# Altium footprint library Propia.PcbLib: 378 footprints (part 21 of 24)
Each footprint in its own frame and in the unit in brackets; x right, y up, seen from the top. Pads: shape width x height; smd on the part's side, far side on the other; paste and mask are expansions set on the pad; w line width, h text height; cw(c..) or ccw(c..) is an arc to the next point about the centre after c.
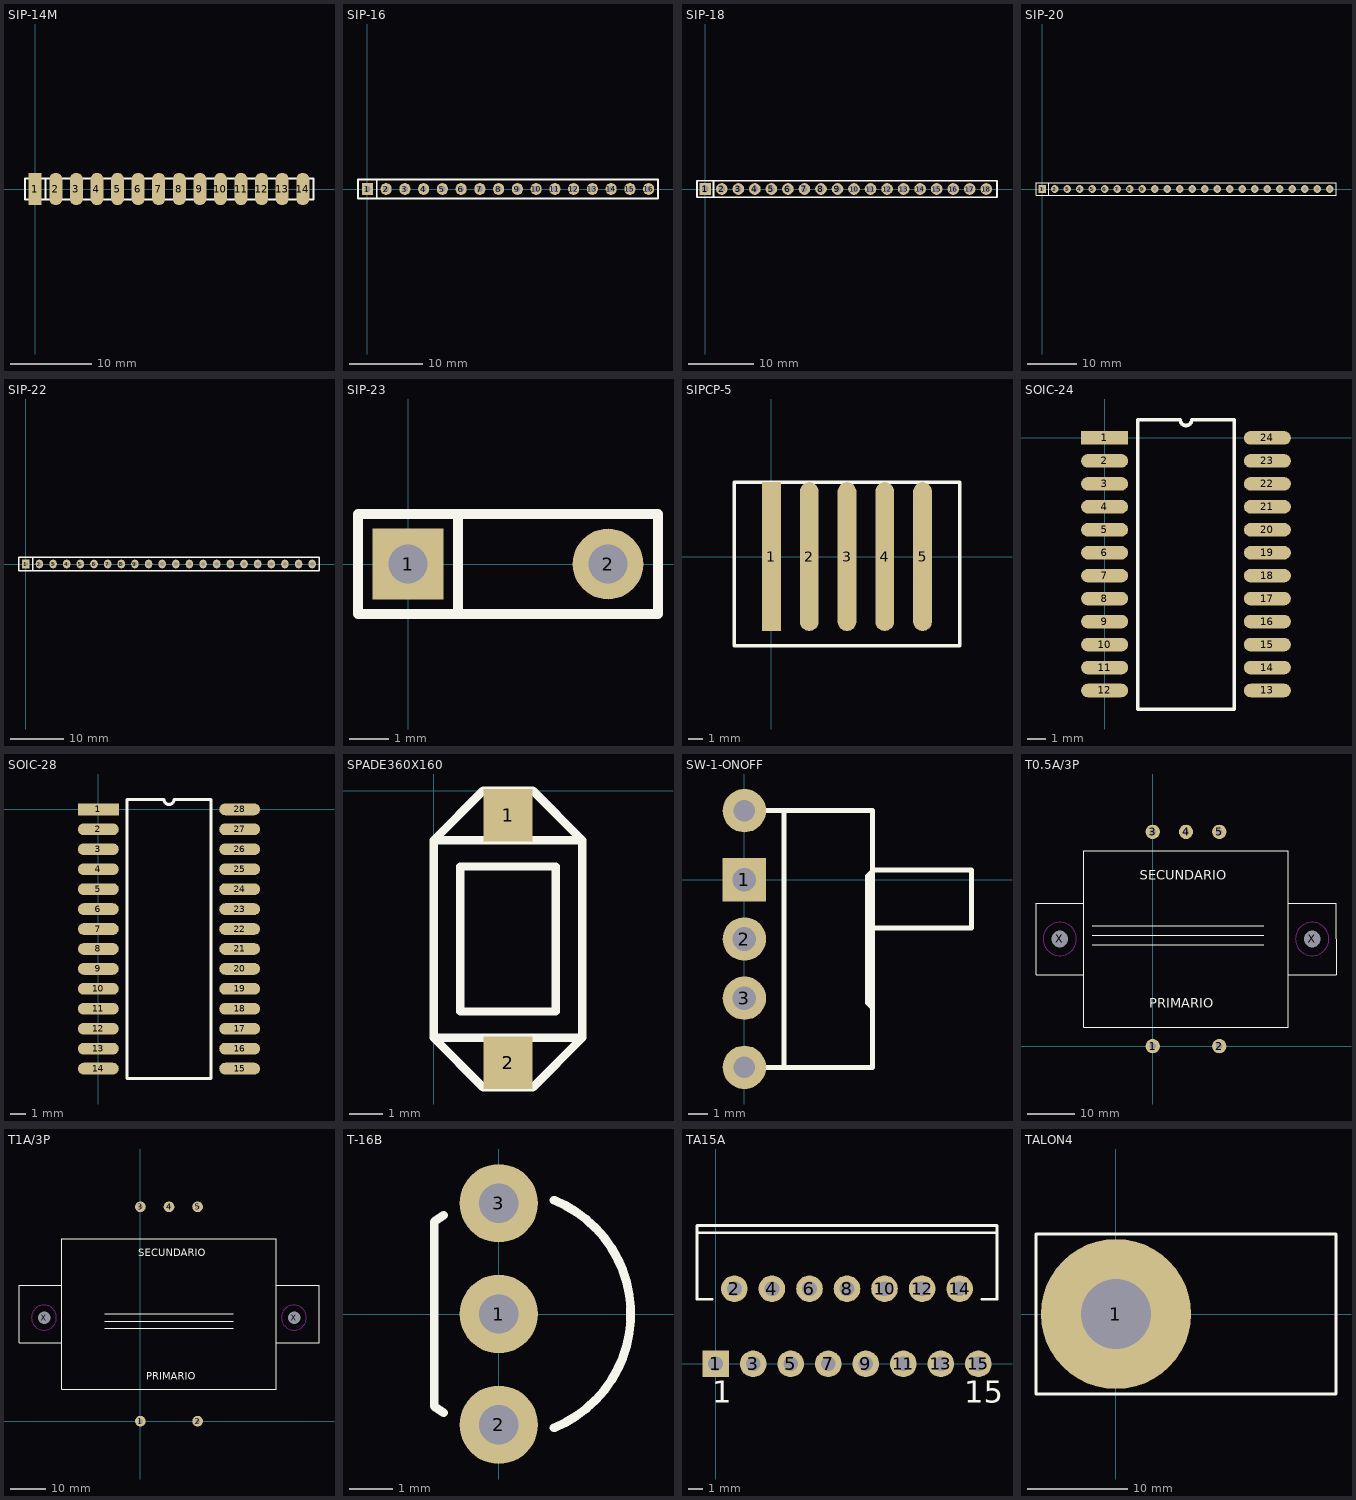
[diagram p20: the footprints below, top view; thin cyan lines are the x and y axes]

## SIP-14M [mm]
pads (14):
  rect 1.6x4 smd: 1(0,0)
  oval 1.6x4 smd: 2(2.54,0) 3(5.08,0) 4(7.62,0) 5(10.16,0) 6(12.7,0) 7(15.24,0) 8(17.78,0) 9(20.32,0) 10(22.86,0) 11(25.4,0) 12(27.94,0) 13(30.48,0) 14(33.02,0)
TopOverlay:
  lines w0.254: 1.27,-1.27 1.27,1.27 ; -1.27,-1.27 34.33,-1.27 34.33,1.27 -1.27,1.27 -1.27,-1.27

## SIP-16 [mm]
pads (16):
  rect 1.5x1.6 hole 0.8: 1(0,0)
  oval 1.5x1.6 hole 0.8: 2(2.54,0) 3(5.08,0) 4(7.62,0) 5(10.16,0) 6(12.7,0) 7(15.24,0) 8(17.78,0) 9(20.32,0) 10(22.86,0) 11(25.4,0) 12(27.94,0) 13(30.48,0) 14(33.02,0) 15(35.56,0) 16(38.1,0)
TopOverlay:
  lines w0.254: 1.27,-1.27 1.27,1.27 ; -1.27,-1.27 -1.27,1.27 39.37,1.27 39.37,-1.27 -1.27,-1.27

## SIP-18 [mm]
pads (18):
  rect 1.8x1.8 hole 1: 1(0,0)
  round 1.8 hole 1: 2(2.54,0) 3(5.08,0) 4(7.62,0) 5(10.16,0) 6(12.7,0) 7(15.24,0) 8(17.78,0) 9(20.32,0) 10(22.86,0) 11(25.4,0) 12(27.94,0) 13(30.48,0) 14(33.02,0) 15(35.56,0) 16(38.1,0) 17(40.64,0) 18(43.18,0)
TopOverlay:
  lines w0.254: 1.27,-1.27 1.27,1.27 ; -1.27,-1.27 44.83,-1.27 44.83,1.27 -1.27,1.27 -1.27,-1.27

## SIP-20 [mm]
pads (24):
  rect 1.5x1.6 hole 0.8: 1(0,0)
  oval 1.5x1.6 hole 0.8: 2(2.54,0) 3(5.08,0) 4(7.62,0) 5(10.16,0) 6(12.7,0) 7(15.24,0) 8(17.78,0) 9(20.32,0) 10(22.86,0) 11(25.4,0) 12(27.94,0) 13(30.48,0) 14(33.02,0) 15(35.56,0) 16(38.1,0) 17(40.64,0) 18(43.18,0) 19(45.72,0) 20(48.26,0) 21(50.8,0) 22(53.34,0) 23(55.88,0) 24(58.42,0)
TopOverlay:
  lines w0.254: 1.27,-1.27 1.27,1.27 ; -1.27,-1.27 59.69,-1.27 59.69,1.27 -1.27,1.27 -1.27,-1.27

## SIP-22 [mm]
pads (22):
  rect 1.4x1.6 hole 0.8: 1(0,0)
  oval 1.4x1.6 hole 0.8: 2(2.54,0) 3(5.08,0) 4(7.62,0) 5(10.16,0) 6(12.7,0) 7(15.24,0) 8(17.78,0) 9(20.32,0) 10(22.86,0) 11(25.4,0) 12(27.94,0) 13(30.48,0) 14(33.02,0) 15(35.56,0) 16(38.1,0) 17(40.64,0) 18(43.18,0) 19(45.72,0) 20(48.26,0) 21(50.8,0) 22(53.34,0)
TopOverlay:
  lines w0.254: 1.27,-1.27 1.27,1.27 ; -1.27,-1.27 54.61,-1.27 54.61,1.27 -1.27,1.27 -1.27,-1.27

## SIP-23 [mm]
pads (2):
  rect 1.8x1.8 hole 1: 1(0,0)
  round 1.8 hole 1: 2(5.08,0)
TopOverlay:
  lines w0.254: 1.27,-1.27 1.27,1.27 ; -1.27,-1.27 -1.27,1.27 6.35,1.27 6.35,-1.27 -1.27,-1.27

## SIPCP-5 [mm]
pads (5):
  rect 1.27x10 smd: 1(0,0)
  oval 1.27x10 smd: 2(2.54,0) 3(5.08,0) 4(7.62,0) 5(10.16,0)
TopOverlay:
  lines w0.254: -2.5,-6 -2.5,5 12.66,5 12.66,-6 -2.5,-6

## SOIC-24 [mm]
pads (24):
  rect 2.6x0.75 smd: 1(0,0)
  oval 2.6x0.75 smd: 2(0,-1.27) 3(0,-2.54) 4(0,-3.81) 5(0,-5.08) 6(0,-6.35) 7(0,-7.62) 8(0,-8.89) 9(0,-10.16) 10(0,-11.43) 11(0,-12.7) 12(0,-13.97) 13(9,-13.97) 14(9,-12.7) 15(9,-11.43) 16(9,-10.16) 17(9,-8.89) 18(9,-7.62) 19(9,-6.35) 20(9,-5.08) 21(9,-3.81) 22(9,-2.54) 23(9,-1.27) 24(9,0)
TopOverlay:
  lines w0.2: 1.835,1 1.835,-15 7.165,-15 7.165,1 ; 1.835,1.005 4.182,1.005 ccw(c4.5,1.005) 4.817,1.005 7.165,1.005

## SOIC-28 [mm]
pads (28):
  rect 2.6x0.75 smd: 1(0,0)
  oval 2.6x0.75 smd: 2(0,-1.27) 3(0,-2.54) 4(0,-3.81) 5(0,-5.08) 6(0,-6.35) 7(0,-7.62) 8(0,-8.89) 9(0,-10.16) 10(0,-11.43) 11(0,-12.7) 12(0,-13.97) 13(0,-15.24) 14(0,-16.51) 15(9,-16.51) 16(9,-15.24) 17(9,-13.97) 18(9,-12.7) 19(9,-11.43) 20(9,-10.16) 21(9,-8.89) 22(9,-7.62) 23(9,-6.35) 24(9,-5.08) 25(9,-3.81) 26(9,-2.54) 27(9,-1.27) 28(9,0)
TopOverlay:
  lines w0.2: 1.835,-17.145 7.165,-17.145 7.165,0.635 4.817,0.635 cw(c4.5,0.635) 4.182,0.635 1.835,0.635 1.835,-17.145

## SPADE360X160 [mm]
pads (2):
  rect 1.5x1.6 smd: 1(2.25,-0.75) 2(2.25,-8.25)
TopOverlay:
  lines w0.254: 0,-7.5 0,-1.5 ; 0,-7.5 4.5,-7.5 ; 0,-7.5 1.5,-9 3,-9 4.5,-7.5 ; 0,-1.5 4.5,-1.5 ; 0,-1.5 1.5,0 3,0 4.5,-1.5 ; 4.5,-7.5 4.5,-1.5 ; 0.8,-6.7 3.7,-6.7 3.7,-2.3 0.8,-2.3 0.8,-6.7

## SW-1-ONOFF [mm]
pads (5):
  rect 2.2x2.2 hole 1.2: 1(0,0)
  round 2.2 hole 1.2: 2(0,-3) 3(0,-6)
  round 2.2 hole 1.1: ""(0,-9.5) ""(0,3.5)
TopOverlay:
  lines w0.254: 0,-9.5 6.5,-9.5 6.5,3.5 0,3.5 ; 2,-9.5 2,3.5 ; 6.5,-6.5 6.25,-6.25 6.25,0.2 6.55,0.5 11.5,0.5 11.5,-2.45 6.5,-2.45

## T0.5A/3P [mm]
pads (7):
  round 3 hole 1.3: 1(0,0) 2(14,0) 3(0,45) 4(7,45) 5(14,45)
  round 3 hole 3.5: X(-19.5,22.5) X(33.5,22.5)
TopOverlay:
  lines w0.254: -14.5,15 -24.5,15 -24.5,30 -14.5,30 ; -12.71,21.33 23.29,21.33 ; -12.71,23.33 23.29,23.33 ; -12.71,25.33 23.29,25.33 ; 28.5,15 38.5,15 38.5,30 28.5,30 ; -14.5,4 -14.5,41 28.5,41 28.5,4 -14.5,4
  text "PRIMARIO" at -0.68,8.03 h2
  text "SECUNDARIO" at -2.73,34.91 h2
KeepOutLayer:
  circle w0.254: c33.49,22.5 r3.5
  circle w0.254: c-19.5,22.5 r3.5

## T1A/3P [mm]
pads (7):
  round 3 hole 1.3: 1(0,0) 2(16,0) 3(0,60) 4(8,60) 5(16,60)
  round 3 hole 3.5: X(-27,29) X(43,29)
TopOverlay:
  lines w0.254: -22,22 -34,22 -34,38 -22,38 ; -10,26 26,26 ; -10,28 26,28 ; -10,30 26,30 ; 38,22 50,22 50,38 38,38 ; -22,9 -22,51 38,51 38,9 -22,9
  text "PRIMARIO" at 1.6,11.53 h2
  text "SECUNDARIO" at -0.6,46.14 h2
KeepOutLayer:
  circle w0.254: c42.99,29 r3.5
  circle w0.254: c-27,29 r3.5

## T-16B [mm]
pads (3):
  round 1.8 hole 0.9: 1(0,0) 2(0,-2.54) 3(0,2.54)
TopOverlay:
  lines w0.2: -1.263,-2.263 -1.482,-2.117 -1.482,2.117 -1.263,2.263 ; 1.266,-2.61 ccw(c0.212,0) 1.266,2.61

## TA15A [mm]
pads (15):
  rect 1.8x1.8 hole 1: 1(0,0)
  round 1.8 hole 1: 2(1.27,5.08) 3(2.54,0) 4(3.81,5.08) 5(5.08,0) 6(6.35,5.08) 7(7.62,0) 8(8.89,5.08) 9(10.16,0) 10(11.43,5.08) 11(12.7,0) 12(13.97,5.08) 13(15.24,0) 14(16.51,5.08) 15(17.78,0)
TopOverlay:
  lines w0.2: -1.26,8.87 18.94,8.87 ; -0.254,4.37 -1.26,4.37 -1.26,9.37 19.04,9.37 19.04,4.37 18.034,4.37
  text "1" at -0.23,-2.625 h1.5
  text "15" at 16.84,-2.625 h1.5

## TALON4 [mm]
pads (1):
  round 15 hole 7: 1(0,0)
TopOverlay:
  lines w0.254: -8,-8 -8,8 22,8 22,-8 -8,-8